# Altium footprint library Ethernet Modbus Dev PCB.PcbLib: 34 footprints (part 2 of 3)
Each footprint in its own frame and in the unit in brackets; x right, y up, seen from the top. Pads: shape width x height; smd on the part's side, far side on the other; paste and mask are expansions set on the pad; w line width, h text height; cw(c..) or ccw(c..) is an arc to the next point about the centre after c.
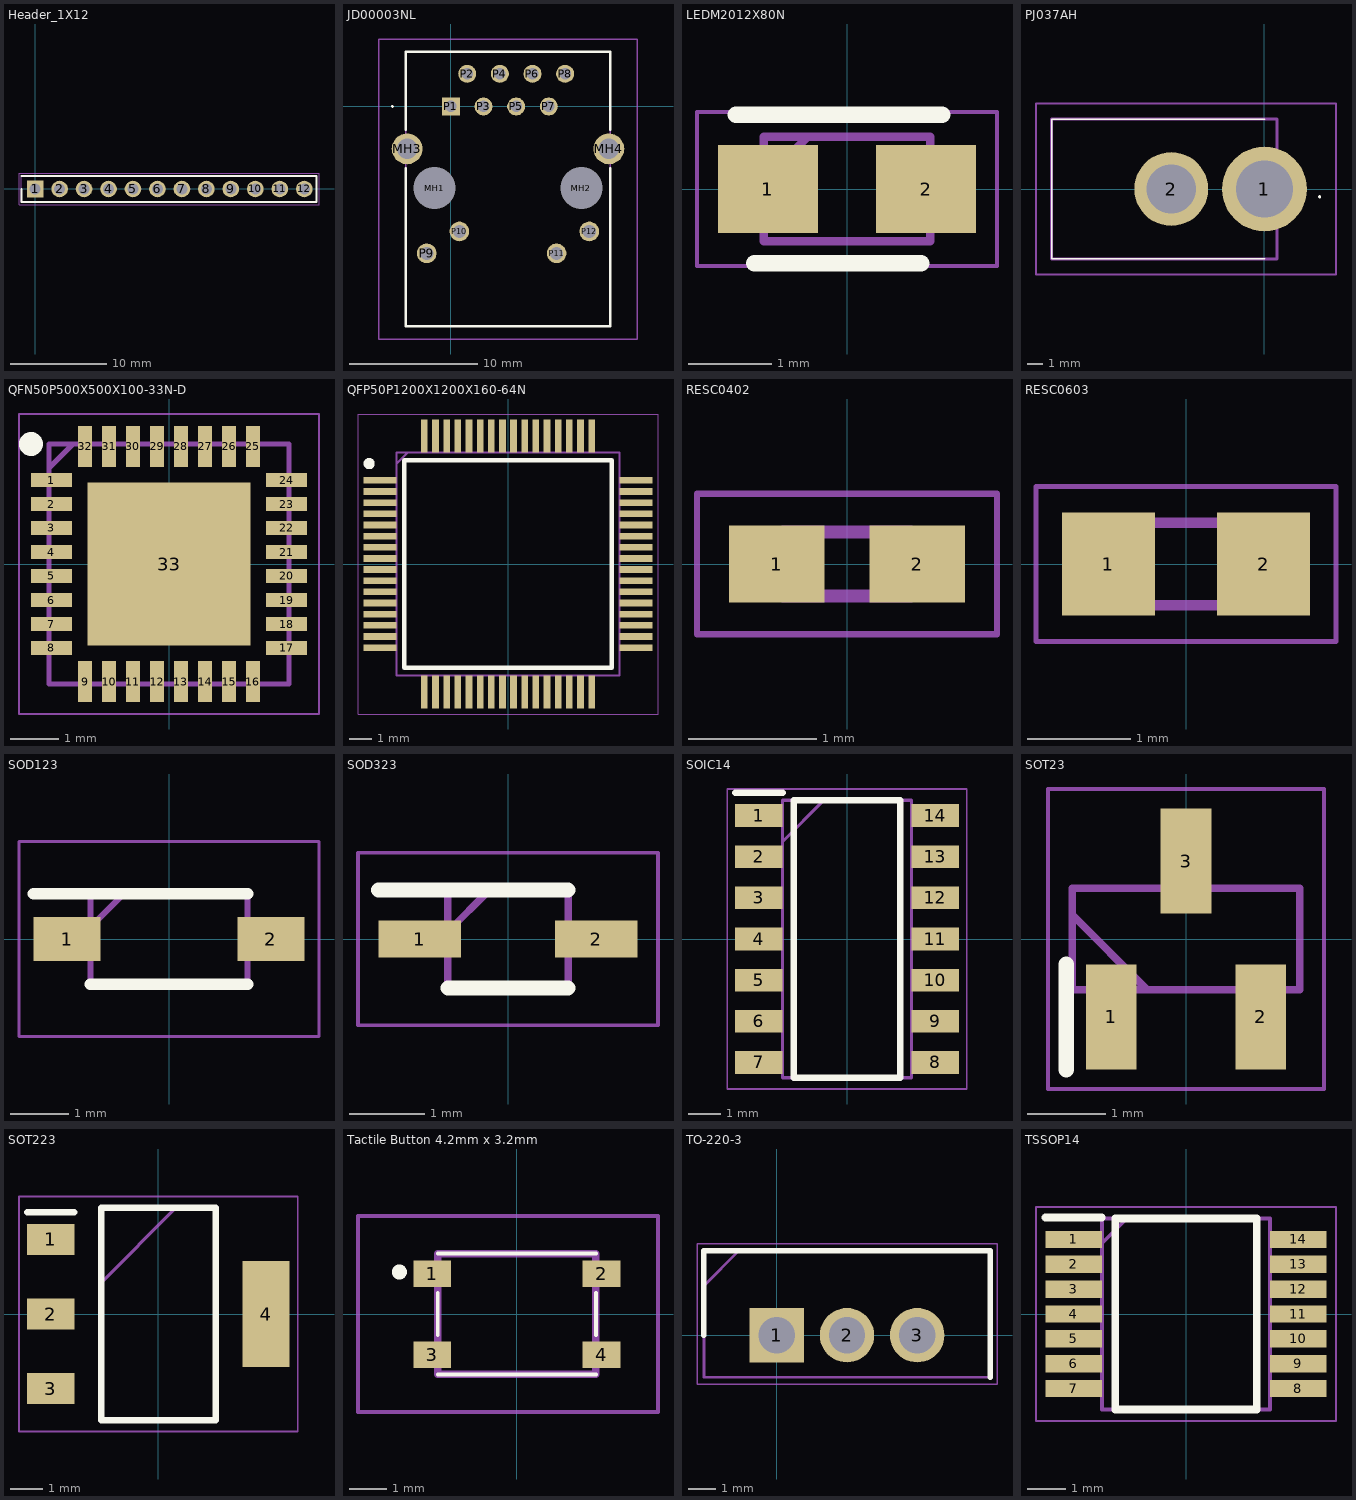
[diagram p1: the footprints below, top view; thin cyan lines are the x and y axes]

## Header_1X12 [mm]
pads (12):
  rect 1.725x1.725 hole 1.15: 1(0,0)
  round 1.725 hole 1.15: 2(2.54,0) 3(5.08,0) 4(7.62,0) 5(10.16,0) 6(12.7,0) 7(15.24,0) 8(17.78,0) 9(20.32,0) 10(22.86,0) 11(25.4,0) 12(27.94,0)
Top Overlay:
  lines w0.2: -1.42,-1.37 -1.42,0 ; -1.397,-1.37 29.21,-1.37 29.21,-0.685 29.21,0.685 29.21,1.37 -1.397,1.37
Mechanical 13:
  lines w0.1: 9.04,-1.37 -1.42,-1.37 -1.42,1.37 9.04,1.37 ; 29.21,-1.397 29.21,1.343
Mechanical 15:
  lines w0.05: -1.67,-1.62 -1.67,1.62 ; -1.651,-1.62 29.464,-1.62 29.464,1.62 -1.651,1.62

## JD00003NL [mm]
pads (16):
  round 1.625 hole 3.25 unplated: MH1(-1.27,-6.35) MH2(10.16,-6.35)
  round 2.4 hole 1.6: MH3(-3.405,-3.3) MH4(12.295,-3.3)
  rect 1.4x1.4 hole 0.9: P1(0,0)
  round 1.4 hole 0.9: P2(1.27,2.54) P3(2.54,0) P4(3.81,2.54) P5(5.08,0) P6(6.35,2.54) P7(7.62,0) P8(8.89,2.54)
  round 1.53 hole 1.02: P9(-1.88,-11.43) P10(0.66,-9.73) P11(8.23,-11.43) P12(10.77,-9.73)
Top Overlay:
  lines w0.1: -4.6,0 ccw(c-4.55,0) -4.5,0 ccw(c-4.55,0) -4.6,0
  lines w0.2: -3.505,-4.8 -3.505,-17.1 12.395,-17.1 12.395,-4.8 ; -3.505,-1.8 -3.505,4.25 12.395,4.25 12.395,-1.8
Mechanical 13:
  lines w0.1: -3.505,-17.1 12.395,-17.1 12.395,4.25 -3.505,4.25 -3.505,-17.1
Mechanical 15:
  lines w0.1: -5.605,-18.1 14.495,-18.1 14.495,5.25 -5.605,5.25 -5.605,-18.1
3D body "JD0-0003NL.stp": height 15.95, standoff -2.98, extent -5.185,-17.1 14.075,4.25

## LEDM2012X80N [mm]
pads (2):
  rect 1.2x1.05 smd: 1(-0.95,0) 2(0.95,0)
Top Overlay:
  lines w0.2: -1.332,0.889 1.143,0.889 ; -1.111,-0.889 0.889,-0.889
Mechanical 13:
  lines w0.1: -1,0.1 -0.475,0.625 ; -1,-0.625 -1,0.625 1,0.625 1,-0.625 -1,-0.625
Mechanical 15:
  lines w0.05: -1.8,-0.925 -1.8,0.925 1.8,0.925 1.8,-0.925 -1.8,-0.925
3D body "150080GS75000.stp": height 0.7, standoff 0, extent -1,-0.625 1,0.625

## PJ037AH [mm]
pads (2):
  round 5.46 hole 3.64: 1(0,0)
  round 4.74 hole 3.16: 2(-6,0)
Top Overlay:
  lines w0.1: 0,-4.5 -13.7,-4.5 -13.7,4.5 0,4.5 ; 3.5,-0.5 ccw(c3.55,-0.5) 3.6,-0.5 ccw(c3.55,-0.5) 3.5,-0.5
Mechanical 13:
  lines w0.2: -13.7,-4.5 0.8,-4.5 0.8,4.5 -13.7,4.5 -13.7,-4.5
Mechanical 15:
  lines w0.1: -14.7,-5.5 4.6,-5.5 4.6,5.5 -14.7,5.5 -14.7,-5.5
3D body "PJ-037AH.stp": height 11, standoff -3.49, extent -13.5,-4.5 1,4.5

## QFN50P500X500X100-33N-D [mm]
pads (33):
  rect 0.85x0.3 smd: 1(-2.45,1.75) 2(-2.45,1.25) 3(-2.45,0.75) 4(-2.45,0.25) 5(-2.45,-0.25) 6(-2.45,-0.75) 7(-2.45,-1.25) 8(-2.45,-1.75) 17(2.45,-1.75) 18(2.45,-1.25) 19(2.45,-0.75) 20(2.45,-0.25) 21(2.45,0.25) 22(2.45,0.75) 23(2.45,1.25) 24(2.45,1.75)
  rect 0.3x0.85 smd: 9(-1.75,-2.45) 10(-1.25,-2.45) 11(-0.75,-2.45) 12(-0.25,-2.45) 13(0.25,-2.45) 14(0.75,-2.45) 15(1.25,-2.45) 16(1.75,-2.45) 25(1.75,2.45) 26(1.25,2.45) 27(0.75,2.45) 28(0.25,2.45) 29(-0.25,2.45) 30(-0.75,2.45) 31(-1.25,2.45) 32(-1.75,2.45)
  rect 3.4x3.4 smd: 33(0,0)
Top Overlay:
  circle w0.25: c-2.875,2.5 r0.125
Mechanical 13:
  lines w0.1: -2.5,2 -2,2.5 ; -2.5,-2.5 -2.5,2.5 2.5,2.5 2.5,-2.5 -2.5,-2.5
Mechanical 15:
  lines w0.05: -3.125,-3.125 -3.125,3.125 3.125,3.125 3.125,-3.125 -3.125,-3.125
3D body "LAN8710A-EZC.stp": height 1, standoff 0, extent -2.55,-2.55 2.55,2.55

## QFP50P1200X1200X160-64N [mm]
pads (64):
  rect 1.475x0.3 smd: 1(-5.738,3.75) 2(-5.738,3.25) 3(-5.738,2.75) 4(-5.738,2.25) 5(-5.738,1.75) 6(-5.738,1.25) 7(-5.738,0.75) 8(-5.738,0.25) 9(-5.738,-0.25) 10(-5.738,-0.75) 11(-5.738,-1.25) 12(-5.738,-1.75) 13(-5.738,-2.25) 14(-5.738,-2.75) 15(-5.738,-3.25) 16(-5.738,-3.75) 33(5.738,-3.75) 34(5.738,-3.25) 35(5.738,-2.75) 36(5.738,-2.25) 37(5.738,-1.75) 38(5.738,-1.25) 39(5.738,-0.75) 40(5.738,-0.25) 41(5.738,0.25) 42(5.738,0.75) 43(5.738,1.25) 44(5.738,1.75) 45(5.738,2.25) 46(5.738,2.75) 47(5.738,3.25) 48(5.738,3.75)
  rect 0.3x1.475 smd: 17(-3.75,-5.738) 18(-3.25,-5.738) 19(-2.75,-5.738) 20(-2.25,-5.738) 21(-1.75,-5.738) 22(-1.25,-5.738) 23(-0.75,-5.738) 24(-0.25,-5.738) 25(0.25,-5.738) 26(0.75,-5.738) 27(1.25,-5.738) 28(1.75,-5.738) 29(2.25,-5.738) 30(2.75,-5.738) 31(3.25,-5.738) 32(3.75,-5.738) 49(3.75,5.738) 50(3.25,5.738) 51(2.75,5.738) 52(2.25,5.738) 53(1.75,5.738) 54(1.25,5.738) 55(0.75,5.738) 56(0.25,5.738) 57(-0.25,5.738) 58(-0.75,5.738) 59(-1.25,5.738) 60(-1.75,5.738) 61(-2.25,5.738) 62(-2.75,5.738) 63(-3.25,5.738) 64(-3.75,5.738)
Top Overlay:
  circle w0.25: c-6.225,4.5 r0.125
  lines w0.2: -4.65,-4.65 -4.65,4.65 4.65,4.65 4.65,-4.65 -4.65,-4.65
Mechanical 13:
  lines w0.1: -5,4.5 -4.5,5 ; -5,-5 -5,5 5,5 5,-5 -5,-5
Mechanical 15:
  lines w0.05: -6.725,-6.725 -6.725,6.725 6.725,6.725 6.725,-6.725 -6.725,-6.725
3D body "FT2232HL.stp": height 1.6, standoff 0, extent -6,-6 6,6

## RESC0402 [mm]
pads (2):
  rect 0.75x0.6 smd: 1(-0.55,0) 2(0.55,0)
Mechanical 13:
  lines w0.1: -0.5,-0.25 -0.5,0.25 0.5,0.25 0.5,-0.25 -0.5,-0.25
Mechanical 15:
  lines w0.05: -1.175,-0.55 -1.175,0.55 1.175,0.55 1.175,-0.55 -1.175,-0.55
3D body "RC0402FR-071ML.stp": height 0.4, standoff 0, extent -0.5,-0.25 0.5,0.25

## RESC0603 [mm]
pads (2):
  rect 0.9x1 smd: 1(-0.75,0) 2(0.75,0)
Mechanical 13:
  lines w0.1: -0.775,-0.4 -0.775,0.4 0.775,0.4 0.775,-0.4 -0.775,-0.4
Mechanical 15:
  lines w0.05: -1.45,-0.75 -1.45,0.75 1.45,0.75 1.45,-0.75 -1.45,-0.75
3D body "RMCF0603ZT0R00.stp": height 0.45, standoff 0, extent -0.774,-0.396 0.776,0.404

## SOD123 [mm]
pads (2):
  rect 1.15x0.75 smd: 1(-1.75,0) 2(1.75,0)
Top Overlay:
  lines w0.2: -2.325,0.775 1.35,0.775 ; -1.35,-0.775 1.35,-0.775
Mechanical 13:
  lines w0.1: -1.35,0.2 -0.775,0.775 ; -1.35,-0.775 -1.35,0.775 1.35,0.775 1.35,-0.775 -1.35,-0.775
Mechanical 15:
  lines w0.05: -2.575,-1.675 -2.575,1.675 2.575,1.675 2.575,-1.675 -2.575,-1.675
3D body "1N4148W_D4.stp": height 1.35, standoff 0, extent -1.85,-0.775 1.85,0.775

## SOD323 [mm]
pads (2):
  rect 1.1x0.5 smd: 1(-1.175,0) 2(1.175,0)
Top Overlay:
  lines w0.2: -1.725,0.65 0.8,0.65 ; -0.8,-0.65 0.8,-0.65
Mechanical 13:
  lines w0.1: -0.8,0.1 -0.25,0.65 ; -0.8,-0.65 -0.8,0.65 0.8,0.65 0.8,-0.65 -0.8,-0.65
Mechanical 15:
  lines w0.05: -2,-1.15 -2,1.15 2,1.15 2,-1.15 -2,-1.15
3D body "1N4007WS.stp": height 1.1, standoff 0, extent -1.325,-0.65 1.325,0.65

## SOIC14 [mm]
pads (14):
  rect 1.462x0.7 smd: 1(-2.719,3.81) 2(-2.719,2.54) 3(-2.719,1.27) 4(-2.719,0) 5(-2.719,-1.27) 6(-2.719,-2.54) 7(-2.719,-3.81) 8(2.719,-3.81) 9(2.719,-2.54) 10(2.719,-1.27) 11(2.719,0) 12(2.719,1.27) 13(2.719,2.54) 14(2.719,3.81)
Top Overlay:
  lines w0.2: -3.45,4.51 -1.988,4.51 ; -1.638,-4.28 -1.638,4.28 1.638,4.28 1.638,-4.28 -1.638,-4.28
Mechanical 13:
  lines w0.1: -1.988,3.01 -0.718,4.28 ; -1.988,-4.28 -1.988,4.28 1.988,4.28 1.988,-4.28 -1.988,-4.28
Mechanical 15:
  lines w0.05: -3.7,-4.63 -3.7,4.63 3.7,4.63 3.7,-4.63 -3.7,-4.63
3D body "LM324M.stp": height 1.8, standoff 0, extent -3,-4.28 3,4.28

## SOT23 [mm]
pads (3):
  rect 0.65x1.35 smd: 1(-0.96,-1) 2(0.96,-1) 3(0,1)
Top Overlay:
  lines w0.2: -1.535,-1.675 -1.535,-0.325
Mechanical 13:
  lines w0.1: -1.46,0.31 -0.5,-0.65 ; -1.46,-0.65 1.46,-0.65 1.46,0.65 -1.46,0.65 -1.46,-0.65
Mechanical 15:
  lines w0.05: -1.77,-1.925 1.77,-1.925 1.77,1.925 -1.77,1.925 -1.77,-1.925
3D body "BAT54C,215.stp": height 0.95, standoff 0, extent -1.452,-1.201 1.448,1.199

## SOT223 [mm]
pads (4):
  rect 1.45x0.95 smd: 1(-3.3,2.29) 2(-3.3,0) 3(-3.3,-2.29)
  rect 1.45x3.25 smd: 4(3.3,0)
Top Overlay:
  lines w0.2: -4.025,3.115 -2.575,3.115 ; -1.752,-3.252 1.752,-3.252 1.752,3.252 -1.752,3.252 -1.752,-3.252
Mechanical 13:
  lines w0.1: -1.752,0.962 0.538,3.252 ; -1.752,-3.252 1.752,-3.252 1.752,3.252 -1.752,3.252 -1.752,-3.252
Mechanical 15:
  lines w0.05: -4.275,-3.605 4.275,-3.605 4.275,3.605 -4.275,3.605 -4.275,-3.605
3D body "AMS1117-3.3.stp": height 1.8, standoff 0, extent -3.355,-3.15 3.355,3.15

## Tactile Button 4.2mm x 3.2mm [mm]
pads (4):
  rect 1x0.7 smd: 1(-2.25,1.075) 2(2.25,1.075) 3(-2.25,-1.075) 4(2.25,-1.075)
Top Overlay:
  lines w0.1: -2.1,-1.6 2.1,-1.6 ; -2.1,-0.56 -2.1,0.56 ; -2.1,1.61 2.1,1.61 ; 2.1,-0.56 2.1,0.56
  lines w0.2: -3.22,1.12 ccw(c-3.12,1.12) -3.02,1.12 ccw(c-3.12,1.12) -3.22,1.12
Mechanical 13:
  lines w0.2: -2.1,-1.6 2.1,-1.6 2.1,1.6 -2.1,1.6 -2.1,-1.6
Mechanical 15:
  lines w0.1: -4.22,-2.6 3.75,-2.6 3.75,2.61 -4.22,2.61 -4.22,-2.6
3D body "PTS815_SJM_250_SMTR_LFS.stp": height 2.6, standoff 0, extent -2.3,-1.6 2.3,1.6

## TO-220-3 [mm]
pads (3):
  rect 1.98x1.98 hole 1.32: 1(0,0)
  round 1.98 hole 1.32: 2(2.55,0) 3(5.1,0)
Top Overlay:
  lines w0.2: -2.65,0 -2.65,3.07 7.75,3.07 7.75,-1.53
Mechanical 13:
  lines w0.1: -2.65,1.795 -1.375,3.07 ; -2.65,-1.53 7.75,-1.53 7.75,3.07 -2.65,3.07 -2.65,-1.53
Mechanical 15:
  lines w0.05: -2.9,-1.78 8,-1.78 8,3.32 -2.9,3.32 -2.9,-1.78
3D body "LD1086V33-DG.stp": height 19.22, standoff -18.2, extent -2.55,-1.53 7.65,3.07

## TSSOP14 [mm]
pads (14):
  rect 1.475x0.45 smd: 1(-2.938,1.95) 2(-2.938,1.3) 3(-2.938,0.65) 4(-2.938,0) 5(-2.938,-0.65) 6(-2.938,-1.3) 7(-2.938,-1.95) 8(2.938,-1.95) 9(2.938,-1.3) 10(2.938,-0.65) 11(2.938,0) 12(2.938,0.65) 13(2.938,1.3) 14(2.938,1.95)
Top Overlay:
  lines w0.2: -3.675,2.525 -2.2,2.525 ; -1.85,-2.5 1.85,-2.5 1.85,2.5 -1.85,2.5 -1.85,-2.5
Mechanical 13:
  lines w0.1: -2.2,1.85 -1.55,2.5 ; -2.2,-2.5 2.2,-2.5 2.2,2.5 -2.2,2.5 -2.2,-2.5
Mechanical 15:
  lines w0.05: -3.925,-2.8 3.925,-2.8 3.925,2.8 -3.925,2.8 -3.925,-2.8
3D body "SN74HCS264PWR.stp": height 1.13, standoff 0, extent -3.2,-2.5 3.2,2.5